# Altium footprint library HFPB_01-PCBLib.PcbLib: 102 footprints (part 4 of 7)
Each footprint in its own frame and in the unit in brackets; x right, y up, seen from the top. Pads: shape width x height; smd on the part's side, far side on the other; paste and mask are expansions set on the pad; w line width, h text height; cw(c..) or ccw(c..) is an arc to the next point about the centre after c.
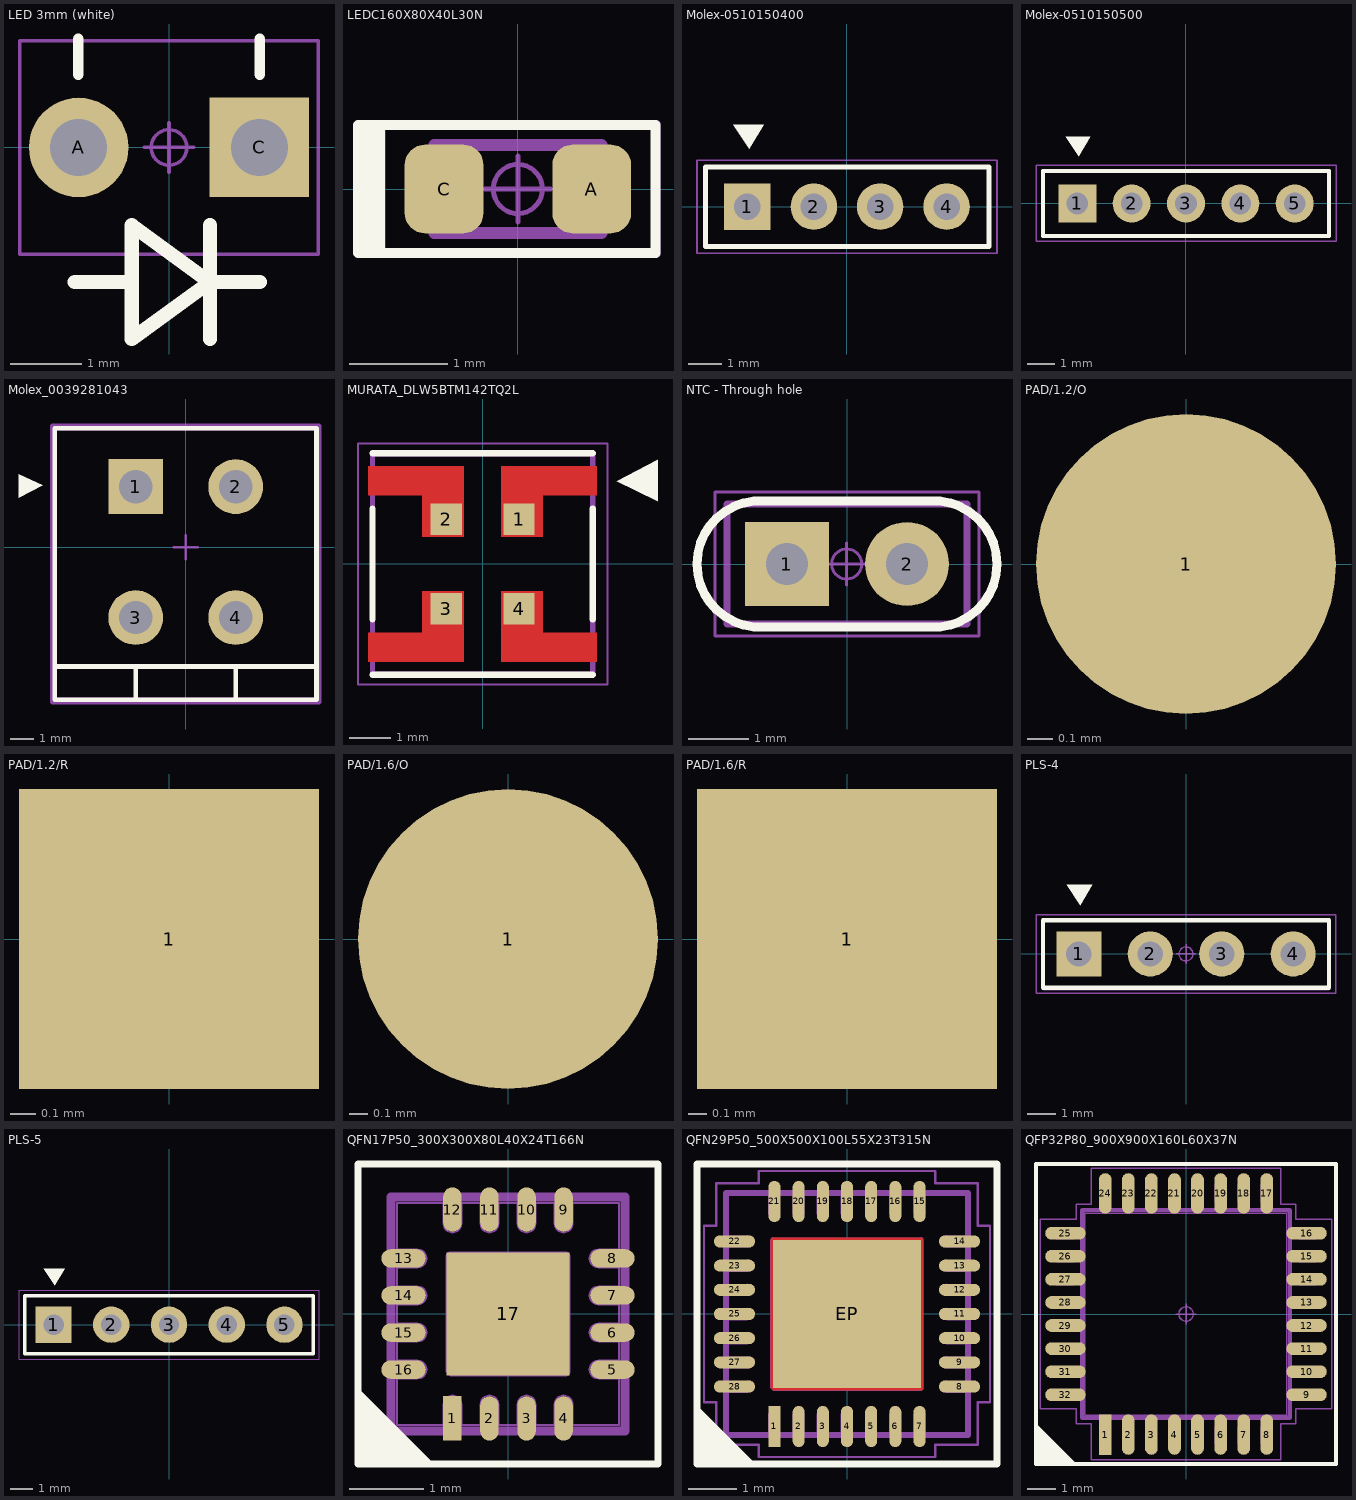
[diagram p3: the footprints below, top view; thin cyan lines are the x and y axes]

## LED 3mm (white) [mm] "Through Hole, Right Angle 2 cont. 5.08mm"
height 3
pads (2):
  round 1.4 hole 0.8: A(-1.27,0)
  rect 1.4x1.4 hole 0.8: C(1.27,0)
Top Overlay:
  lines w0.15: -1.275,1.025 -1.275,1.525 ; 1.275,1.025 1.275,1.525
  lines w0.2: -1.325,-1.893 -0.525,-1.893 ; 0.575,-2.693 0.575,-1.093 ; 1.275,-1.893 0.575,-1.893 ; 0.575,-1.893 -0.525,-2.693 -0.525,-1.093 0.575,-1.893
Mechanical 15:
  circle w0.05: c0,0 r0.25
  lines w0.05: -0.35,0 0.35,0 ; 0,-0.35 0,0.35 ; -2.1,-1.5 -2.1,1.5 2.1,1.5 2.1,-1.5 -2.1,-1.5
Mechanical 16:
  text ".Designator" at -2.275,3.4 h1.2
3D body "LED-3mm-white+.stp": height 1.92, standoff -1.92, extent -1.445,-0.675 2,17.125

## LEDC160X80X40L30N [mm] "LED, Chip; 1.60 mm L X 0.80 mm W X 0.40 mm H body"
height 0.4
pads (2):
  rrect50% 0.8x0.9 smd: A(0.75,0) C(-0.75,0)
Top Overlay:
  lines w0.1: -1.55,-0.65 -1.55,0.65 ; -1.525,-0.65 -1.525,0.65 ; -1.475,-0.65 -1.475,0.65 ; -1.4,-0.65 -1.4,0.65 ; -1.625,-0.65 1.4,-0.65 1.4,0.65 -1.625,0.65 -1.625,-0.65
Mechanical 11:
  lines w0.12: -0.85,-0.45 0.85,-0.45 0.85,0.45 -0.85,0.45 -0.85,-0.45
Mechanical 12:
  lines w0.025: -0.8,-0.4 0.8,-0.4 ; -0.8,-0.4 -0.8,0.4 ; -0.8,-0.4 -0.8,0.4 ; -0.8,-0.4 -0.5,-0.4 -0.5,0.4 -0.8,0.4 ; -0.8,0.4 0.8,0.4 ; 0.8,-0.4 0.8,0.4 ; 0.8,-0.4 0.5,-0.4 0.5,0.4 0.8,0.4 ; 0.8,-0.4 0.8,0.4
Mechanical 15:
  circle w0.05: c0,0 r0.25
  lines w0.05: -0.335,0 0.335,0 ; 0,-0.335 0,0.335 ; -1.37,-0.67 1.425,-0.67 1.425,0.67 -1.37,0.67 -1.37,-0.67
Mechanical 16:
  text ".Designator" at 0.325,0.925 h1.2
3D body "STEP-WL-SMCW-0603-rev1.stp": height 0.7, standoff 0, extent -0.775,-0.4 0.825,0.4

## Molex-0510150400 [mm] "Header, Vertical, 2.00 mm pitch, 4 pins, 1 row, 4 pins per row"
height 3.8
pads (4):
  rect 1.4x1.4 hole 0.8 paste-1.6: 1(-3,0)
  round 1.4 hole 0.8 paste-1.6: 2(-1,0) 3(1,0) 4(3,0)
Top Overlay:
  region: -2.514,2.463 -3.421,2.463 -2.949,1.737
  lines w0.15: -4.27,-1.2 -4.27,1.2 4.275,1.2 4.275,-1.2 -4.27,-1.2
Mechanical 11:
  lines w0.12: -4.27,-1.2 -4.27,1.2 4.275,1.2 4.275,-1.2 -4.27,-1.2
Mechanical 12:
  lines w0.025: -4.27,-1.2 -4.27,1.2 4.275,1.2 4.275,-1.2 -4.27,-1.2 ; -3.32,-0.32 -3.32,0.32 -2.68,0.32 -2.68,-0.32 -3.32,-0.32 ; -1.33,-0.32 -1.33,0.32 -0.69,0.32 -0.69,-0.32 -1.33,-0.32 ; 0.68,-0.325 0.68,0.315 1.32,0.315 1.32,-0.325 0.68,-0.325 ; 2.67,-0.325 3.31,-0.325 3.31,0.315 2.67,0.315 2.67,-0.325
Mechanical 15:
  circle w0.05: c0.81,0 r0.25
  lines w0.05: 0.46,0 1.16,0 ; 0.81,-0.35 0.81,0.35 ; -4.52,-1.4 -4.52,1.4 4.52,1.4 4.52,-1.4 -4.52,-1.4
Mechanical 16:
  text ".Designator" at -3,0 h1.2

## Molex-0510150500 [mm] "Header, Vertical, 2.00 mm pitch, 5 pins, 1 row, 5 pins per row"
height 3.8
pads (5):
  rect 1.4x1.4 hole 0.8 paste-1.6: 1(-4,0)
  round 1.4 hole 0.8 paste-1.6: 2(-2,0) 3(0,0) 4(2,0) 5(4,0)
Top Overlay:
  region: -3.514,2.463 -4.421,2.463 -3.949,1.737
  lines w0.15: -5.27,-1.2 5.27,-1.2 5.27,1.2 -5.27,1.2 -5.27,-1.2
Mechanical 11:
  lines w0.12: -5.27,-1.2 5.27,-1.2 5.27,1.2 -5.27,1.2 -5.27,-1.2
Mechanical 12:
  lines w0.025: -5.27,-1.2 5.27,-1.2 5.27,1.2 -5.27,1.2 -5.27,-1.2 ; -4.32,-0.32 -3.68,-0.32 -3.68,0.32 -4.32,0.32 -4.32,-0.32 ; -2.33,-0.32 -1.69,-0.32 -1.69,0.32 -2.33,0.32 -2.33,-0.32 ; -0.32,-0.325 0.32,-0.325 0.32,0.315 -0.32,0.315 -0.32,-0.325 ; 1.67,-0.325 1.67,0.315 2.31,0.315 2.31,-0.325 1.67,-0.325
Mechanical 15:
  circle w0.05: c-0.19,0 r0.25
  lines w0.05: -0.54,0 0.16,0 ; -0.19,-0.35 -0.19,0.35 ; -5.52,-1.4 5.52,-1.4 5.52,1.4 -5.52,1.4 -5.52,-1.4
Mechanical 16:
  text ".Designator" at -4,0 h1.2

## Molex_0039281043 [mm] "Connector Header Through Hole 4 position 4.2mm"
height 12.8
pads (4):
  rect 2.3x2.3 hole 1.4 paste-1000 mask+0: 1(-2.1,2.55)
  round 2.3 hole 1.4 paste-1000 mask+0: 2(2.1,2.55) 3(-2.1,-2.95) 4(2.1,-2.95)
Top Overlay:
  region: -7,3.075 -7,2.075 -6.012,2.601
  lines w0.2: -5.5,-5 5.5,-5 ; -2.1,-6.4 -2.1,-5 ; 2.1,-6.4 2.1,-5 ; -5.5,-6.4 -5.5,5 5.5,5 5.5,-6.4 -5.5,-6.4
Mechanical 10:
  lines w0.2: -5.6,-6.5 -5.6,5.1 5.6,5.1 5.6,-6.5 -5.6,-6.5
  text ".Designator" at 0.1,-0.7 h1
Mechanical 12:
  lines w0.2: -5.5,-6.4 -5.5,5 5.5,5 5.5,-6.4 -5.5,-6.4
Mechanical 15:
  lines w0.1: -0.5,0 0.5,0 ; 0,-0.5 0,0.5
  lines w0.2: -5.6,-6.5 -5.6,5.1 5.6,5.1 5.6,-6.5 -5.6,-6.5
3D body "Conn_Molex_0039281043_eec.STEP": height 0.25, standoff 0, extent -5.6,-6.5 5.8,5.1

## MURATA_DLW5BTM142TQ2L [mm]
pads (4):
  rect 0.75x0.75 smd: 1(0.875,1.075) 2(-0.875,1.075) 3(-0.875,-1.075) 4(0.875,-1.075)
Top Layer:
  region: -0.45,-2.35 -2.75,-2.35 -2.75,-1.65 -1.45,-1.65 -1.45,-0.65 -0.45,-0.65
  region: 2.75,1.65 1.45,1.65 1.45,0.65 0.45,0.65 0.45,2.35 2.75,2.35
  region: 1.45,-1.65 2.75,-1.65 2.75,-2.35 0.45,-2.35 0.45,-0.65 1.45,-0.65
  region: -0.45,0.65 -1.45,0.65 -1.45,1.65 -2.75,1.65 -2.75,2.35 -0.45,2.35
Top Overlay:
  region: 4.219,1.513 4.219,2.513 3.231,1.987
  lines w0.15: -2.65,-2.663 2.65,-2.663 ; -2.65,-1.336 -2.65,1.336 ; -2.65,2.663 2.65,2.663 ; 2.65,-1.336 2.65,1.336
Top Paste:
  region: -0.45,-2.35 -2.75,-2.35 -2.75,-1.65 -1.45,-1.65 -1.45,-0.65 -0.45,-0.65
  region: 2.75,1.65 1.45,1.65 1.45,0.65 0.45,0.65 0.45,2.35 2.75,2.35
  region: 1.45,-1.65 2.75,-1.65 2.75,-2.35 0.45,-2.35 0.45,-0.65 1.45,-0.65
  region: -0.45,0.65 -1.45,0.65 -1.45,1.65 -2.75,1.65 -2.75,2.35 -0.45,2.35
Top Solder:
  region: -0.4,-2.4 -2.8,-2.4 -2.8,-1.6 -1.5,-1.6 -1.5,-0.6 -0.4,-0.6
  region: 2.8,1.6 1.5,1.6 1.5,0.6 0.4,0.6 0.4,2.4 2.8,2.4
  region: 1.5,-1.6 2.8,-1.6 2.8,-2.4 0.4,-2.4 0.4,-0.6 1.5,-0.6
  region: -0.4,0.6 -1.5,0.6 -1.5,1.6 -2.8,1.6 -2.8,2.4 -0.4,2.4
Mechanical 13:
  lines w0.127: -2.65,-2.65 -2.65,2.65 2.65,2.65 2.65,-2.65 -2.65,-2.65
Mechanical 15:
  lines w0.05: -3,-2.9 -3,2.9 3,2.9 3,-2.9 -3,-2.9
3D body "DLW5BTM142TQ2L--3DModel-STEP-1.STEP": height 2.5, standoff 0, extent -2.5,-2.5 2.5,2.5

## NTC - Through hole [mm]
pads (2):
  rect 1.4x1.4 hole 0.7 paste-1.6: 1(-1,0)
  round 1.4 hole 0.7 paste-1.6: 2(1,0)
Top Overlay:
  lines w0.15: -1.55,-1.05 cw(c-1.445,0) -1.55,1.05 1.55,1.05 cw(c1.445,0) 1.55,-1.05 -1.55,-1.05
Mechanical 11:
  lines w0.12: -2,-1 -2,1 2,1 2,-1 -2,-1
Mechanical 12:
  lines w0.025: -2,-1 -2,1 2.002,1 2.002,-1 -2,-1 ; -1.315,-0.32 -1.315,0.32 -0.675,0.32 -0.675,-0.32 -1.315,-0.32 ; 0.68,-0.32 0.68,0.32 1.32,0.32 1.32,-0.32 0.68,-0.32
Mechanical 15:
  circle w0.05: c-0.005,0 r0.25
  lines w0.05: -0.355,0 0.345,0 ; -0.005,-0.35 -0.005,0.35 ; -2.2,-1.2 -2.2,1.2 2.2,1.2 2.2,-1.2 -2.2,-1.2
Mechanical 16:
  text ".Designator" at -1.15,1.45 h1.2

## PAD/1.2/O [mm] "PAD SMD 1.2mm"
pads (1):
  round 1.2 smd: 1(0,0)
Mechanical 12:
  lines w0.025: -0.28,-0.15 -0.28,0.15 0.28,0.15 0.28,-0.15 -0.28,-0.15
Mechanical 15:
  circle w0.05: c0,0 r0.25
  lines w0.05: -0.35,0 0.35,0 ; 0,-0.35 0,0.35
Mechanical 16:
  text ".Designator" at -0.8,1.3 h1.2

## PAD/1.2/R [mm] "PAD SMD 1.2mm"
pads (1):
  rect 1.2x1.2 smd: 1(0,0)
Mechanical 12:
  lines w0.025: -0.28,-0.15 0.28,-0.15 0.28,0.15 -0.28,0.15 -0.28,-0.15
Mechanical 15:
  circle w0.05: c0,0 r0.25
  lines w0.05: -0.35,0 0.35,0 ; 0,-0.35 0,0.35
Mechanical 16:
  text ".Designator" at -0.8,1.3 h1.2

## PAD/1.6/O [mm] "PAD SMD 1.6mm"
pads (1):
  round 1.6 smd: 1(0,0)
Mechanical 12:
  lines w0.025: -0.28,-0.15 -0.28,0.15 0.28,0.15 0.28,-0.15 -0.28,-0.15
Mechanical 15:
  circle w0.05: c0,0 r0.25
  lines w0.05: -0.35,0 0.35,0 ; 0,-0.35 0,0.35
Mechanical 16:
  text ".Designator" at -0.8,1.3 h1.2

## PAD/1.6/R [mm] "PAD SMD 1.6mm"
pads (1):
  rect 1.6x1.6 smd: 1(0,0)
Mechanical 12:
  lines w0.025: -0.28,-0.15 -0.28,0.15 0.28,0.15 0.28,-0.15 -0.28,-0.15
Mechanical 15:
  circle w0.05: c0,0 r0.25
  lines w0.05: -0.35,0 0.35,0 ; 0,-0.35 0,0.35
Mechanical 16:
  text ".Designator" at -0.8,1.3 h1.2

## PLS-4 [mm] "Header, Vertical, 2.54 mm pitch; 0.64 mm lead width, 4 pins, 1 row, 4 pins per row, 10.16 mm L X 2.54 mm W X 8.40 mm H body"
height 8.4
pads (4):
  rect 1.6x1.6 hole 0.9 paste-1.6: 1(-3.81,0)
  round 1.6 hole 0.9 paste-1.6: 2(-1.27,0) 3(1.27,0) 4(3.81,0)
Top Overlay:
  region: -3.324,2.463 -4.231,2.463 -3.759,1.737
  lines w0.15: -5.08,-1.2 5.08,-1.2 5.08,1.2 -5.08,1.2 -5.08,-1.2
Mechanical 11:
  lines w0.12: -5.08,-1.2 5.08,-1.2 5.08,1.2 -5.08,1.2 -5.08,-1.2
Mechanical 12:
  lines w0.025: -5.08,-1.27 5.08,-1.27 5.08,1.27 -5.08,1.27 -5.08,-1.27 ; -4.13,-0.32 -3.49,-0.32 -3.49,0.32 -4.13,0.32 -4.13,-0.32 ; -1.59,-0.32 -0.95,-0.32 -0.95,0.32 -1.59,0.32 -1.59,-0.32 ; 0.95,-0.32 1.59,-0.32 1.59,0.32 0.95,0.32 0.95,-0.32 ; 3.5,-0.315 3.5,0.325 4.14,0.325 4.14,-0.315 3.5,-0.315
Mechanical 15:
  circle w0.05: c0,0 r0.25
  lines w0.05: -0.35,0 0.35,0 ; 0,-0.35 0,0.35 ; -5.33,-1.4 5.33,-1.4 5.33,1.4 -5.33,1.4 -5.33,-1.4
Mechanical 16:
  text ".Designator" at -3.81,0 h1.2
3D body "HDRV4W62P254_4X1_1016X241H838.STEP": height 8.38, standoff -2, extent -5.08,-1.205 5.08,1.205

## PLS-5 [mm] "Header, Vertical, 2.54 mm pitch; 0.64 mm lead width, 5 pins, 1 row, 5 pins per row, 12.70 mm L X 2.54 mm W X 8.40 mm H body"
height 8.4
pads (5):
  rect 1.6x1.6 hole 0.9 paste-1.6: 1(-5.08,0)
  round 1.6 hole 0.9 paste-1.6: 2(-2.54,0) 3(0,0) 4(2.54,0) 5(5.08,0)
Top Overlay:
  region: -4.594,2.463 -5.501,2.463 -5.029,1.737
  lines w0.15: -6.35,-1.27 6.35,-1.27 6.35,1.27 -6.35,1.27 -6.35,-1.27
Mechanical 11:
  lines w0.12: -6.35,-1.27 6.35,-1.27 6.35,1.27 -6.35,1.27 -6.35,-1.27
Mechanical 12:
  lines w0.025: -6.35,-1.27 6.35,-1.27 6.35,1.27 -6.35,1.27 -6.35,-1.27 ; -5.4,-0.32 -4.76,-0.32 -4.76,0.32 -5.4,0.32 -5.4,-0.32 ; -2.86,-0.32 -2.22,-0.32 -2.22,0.32 -2.86,0.32 -2.86,-0.32 ; -0.32,-0.32 0.32,-0.32 0.32,0.32 -0.32,0.32 -0.32,-0.32 ; 2.22,-0.32 2.86,-0.32 2.86,0.32 2.22,0.32 2.22,-0.32 ; 4.76,-0.32 5.4,-0.32 5.4,0.32 4.76,0.32 4.76,-0.32
Mechanical 15:
  circle w0.05: c-5.08,0 r0.25
  lines w0.05: -5.43,0 -4.73,0 ; -5.08,-0.35 -5.08,0.35 ; -6.6,-1.52 6.6,-1.52 6.6,1.52 -6.6,1.52 -6.6,-1.52
Mechanical 16:
  text ".Designator" at -5.08,0 h1.2
3D body "HDRV5W63P254_5X1_1270X254H840.STEP": height 8.4, standoff -2, extent -6.35,-1.27 6.35,1.27

## QFN17P50_300X300X80L40X24T166N [mm] "Quad Flat No-Lead (QFN with Tab), 0.50 mm pitch; square, 4 pin X 4 pin, 3.00 mm L X 3.00 mm W X 0.80 mm H body"
height 0.8
pads (17):
  rect 0.25x0.6 smd: 1(-0.75,-1.41)
  oval 0.25x0.6 smd: 2(-0.25,-1.41) 3(0.25,-1.41) 4(0.75,-1.41) 9(0.75,1.41) 10(0.25,1.41) 11(-0.25,1.41) 12(-0.75,1.41)
  oval 0.6x0.25 smd: 5(1.41,-0.75) 6(1.41,-0.25) 7(1.41,0.25) 8(1.41,0.75) 13(-1.41,0.75) 14(-1.41,0.25) 15(-1.41,-0.25) 16(-1.41,-0.75)
  rect 1.66x1.66 smd: 17(0,0)
Top Overlay:
  region: -2.025,-1 -2.025,-2.025 -1,-2.025
  lines w0.1: -2.025,-2.025 2.025,-2.025 2.025,2.025 -2.025,2.025 -2.025,-2.025
Top Paste:
  region: 0.71,-0.71 0.12,-0.71 0.12,-0.12 0.71,-0.12
  region: 0.71,0.12 0.12,0.12 0.12,0.71 0.71,0.71
  region: -0.12,-0.71 -0.71,-0.71 -0.71,-0.12 -0.12,-0.12
  region: -0.12,0.12 -0.71,0.12 -0.71,0.71 -0.12,0.71
Mechanical 11:
  lines w0.12: -1.58,-1.58 -1.58,1.58 1.58,1.58 1.58,-1.58 -1.58,-1.58
Mechanical 12:
  lines w0.025: -1.5,-1.5 -1.5,1.5 1.5,1.5 1.5,-1.5 -1.5,-1.5 ; -1.5,-0.87 -1.22,-0.87 ccw(c-1.22,-0.75) -1.22,-0.63 -1.5,-0.63 -1.5,-0.87 ; -1.5,-0.37 -1.22,-0.37 ccw(c-1.22,-0.25) -1.22,-0.13 -1.5,-0.13 -1.5,-0.37 ; -1.5,0.13 -1.22,0.13 ccw(c-1.22,0.25) -1.22,0.37 -1.5,0.37 -1.5,0.13 ; -1.5,0.63 -1.22,0.63 ccw(c-1.22,0.75) -1.22,0.87 -1.5,0.87 -1.5,0.63 ; -0.87,-1.5 -0.87,-1.22 cw(c-0.75,-1.22) -0.63,-1.22 -0.63,-1.5 -0.87,-1.5 ; -0.87,1.22 ccw(c-0.75,1.22) -0.63,1.22 -0.63,1.5 -0.87,1.5 -0.87,1.22 ; -0.83,-0.78 -0.83,0.78 cw(c-0.78,0.78) -0.78,0.83 0.78,0.83 cw(c0.78,0.78) 0.83,0.78 0.83,-0.78 cw(c0.78,-0.78) 0.78,-0.83 -0.78,-0.83 -0.83,-0.78 ; -0.37,-1.5 -0.37,-1.22 cw(c-0.25,-1.22) -0.13,-1.22 -0.13,-1.5 -0.37,-1.5 ; -0.37,1.22 ccw(c-0.25,1.22) -0.13,1.22 -0.13,1.5 -0.37,1.5 -0.37,1.22 ; 0.13,-1.5 0.13,-1.22 cw(c0.25,-1.22) 0.37,-1.22 0.37,-1.5 0.13,-1.5 ; 0.13,1.22 ccw(c0.25,1.22) 0.37,1.22 0.37,1.5 0.13,1.5 0.13,1.22 ; 0.63,-1.5 0.63,-1.22 cw(c0.75,-1.22) 0.87,-1.22 0.87,-1.5 0.63,-1.5 ; 0.63,1.22 ccw(c0.75,1.22) 0.87,1.22 0.87,1.5 0.63,1.5 0.63,1.22 ; 1.22,-0.87 cw(c1.22,-0.75) 1.22,-0.63 1.5,-0.63 1.5,-0.87 1.22,-0.87 ; 1.22,-0.37 cw(c1.22,-0.25) 1.22,-0.13 1.5,-0.13 1.5,-0.37 1.22,-0.37 ; 1.22,0.13 cw(c1.22,0.25) 1.22,0.37 1.5,0.37 1.5,0.13 1.22,0.13 ; 1.22,0.63 cw(c1.22,0.75) 1.22,0.87 1.5,0.87 1.5,0.63 1.22,0.63
Mechanical 15:
  circle w0.05: c0,0 r0.25
  lines w0.05: -0.35,0 0.35,0 ; 0,-0.35 0,0.35 ; -2.025,-2.025 -2.025,2.025 2.025,2.025 2.025,-2.025 1.08,-2.025 -2.025,-2.025
Mechanical 16:
  text ".Designator" at 0,0 h1.2
3D body "QFN17P50_300X300X80L40X24T166.STEP": height 0.8, standoff 0, extent -1.55,-1.55 1.55,1.55

## QFN29P50_500X500X100L55X23T315N [mm] "Quad Flat No-Lead (QFN with Tab), 0.50 mm pitch; square, 7 pin X 7 pin, 5.00 mm L X 5.00 mm W X 1.00 mm H body"
height 1
pads (29):
  rect 0.25x0.85 smd: 1(-1.5,-2.325)
  oval 0.25x0.85 smd: 2(-1,-2.325) 3(-0.5,-2.325) 4(0,-2.325) 5(0.5,-2.325) 6(1,-2.325) 7(1.5,-2.325) 15(1.5,2.325) 16(1,2.325) 17(0.5,2.325) 18(0,2.325) 19(-0.5,2.325) 20(-1,2.325) 21(-1.5,2.325)
  oval 0.85x0.25 smd: 8(2.325,-1.5) 9(2.325,-1) 10(2.325,-0.5) 11(2.325,0) 12(2.325,0.5) 13(2.325,1) 14(2.325,1.5) 22(-2.325,1.5) 23(-2.325,1) 24(-2.325,0.5) 25(-2.325,0) 26(-2.325,-0.5) 27(-2.325,-1) 28(-2.325,-1.5)
  rect 3.05x3.05 smd paste-3.05 mask-3.05: EP(0,0)
Top Layer:
  region: 1.575,0 1.575,-1.525 1.574,-1.533 1.573,-1.54 1.57,-1.548 1.566,-1.554 1.56,-1.56 1.554,-1.566 1.548,-1.57 1.54,-1.573 1.533,-1.574 -1.525,-1.575 -1.575,-1.525 -1.575,1.525 -1.574,1.533 -1.573,1.54 -1.57,1.548 -1.566,1.554 -1.56,1.56 -1.554,1.566 -1.548,1.57 -1.54,1.573 -1.533,1.574 1.525,1.575 1.533,1.574 1.54,1.573 1.548,1.57 1.554,1.566 1.56,1.56 1.566,1.554 1.57,1.548 1.573,1.54 1.574,1.533 1.575,1.525
Top Overlay:
  region: -3.1,-1.9 -3.1,-3.1 -1.9,-3.1
  lines w0.15: -3.1,-3.1 3.1,-3.1 3.1,3.1 -3.1,3.1 -3.1,-3.1
Top Paste:
  region: -0.23,0.23 -1.34,0.23 -1.34,1.34 -0.23,1.34
  region: -0.23,-1.34 -1.34,-1.34 -1.34,-0.23 -0.23,-0.23
  region: 1.34,0.23 0.23,0.23 0.23,1.34 1.34,1.34
  region: 1.34,-1.34 0.23,-1.34 0.23,-0.23 1.34,-0.23
Top Solder:
  region: 1.575,0 1.575,-1.525 1.574,-1.533 1.573,-1.54 1.57,-1.548 1.566,-1.554 1.56,-1.56 1.554,-1.566 1.548,-1.57 1.54,-1.573 1.533,-1.574 -1.525,-1.575 -1.575,-1.525 -1.575,1.525 -1.574,1.533 -1.573,1.54 -1.57,1.548 -1.566,1.554 -1.56,1.56 -1.554,1.566 -1.548,1.57 -1.54,1.573 -1.533,1.574 1.525,1.575 1.533,1.574 1.54,1.573 1.548,1.57 1.554,1.566 1.56,1.56 1.566,1.554 1.57,1.548 1.573,1.54 1.574,1.533 1.575,1.525
Mechanical 11:
  lines w0.12: -2.5,-2.5 2.5,-2.5 2.5,2.5 -2.5,2.5 -2.5,-2.5
Mechanical 12:
  lines w0.025: -2.5,-2.5 2.5,-2.5 2.5,2.5 -2.5,2.5 -2.5,-2.5 ; -2.5,-1.615 -2.5,-1.385 -2.065,-1.385 cw(c-2.065,-1.5) -2.065,-1.615 -2.5,-1.615 ; -2.5,-1.115 -2.5,-0.885 -2.065,-0.885 cw(c-2.065,-1) -2.065,-1.115 -2.5,-1.115 ; -2.5,-0.615 -2.5,-0.385 -2.065,-0.385 cw(c-2.065,-0.5) -2.065,-0.615 -2.5,-0.615 ; -2.5,-0.115 -2.5,0.115 -2.065,0.115 cw(c-2.065,0) -2.065,-0.115 -2.5,-0.115 ; -2.5,0.385 -2.5,0.615 -2.065,0.615 cw(c-2.065,0.5) -2.065,0.385 -2.5,0.385 ; -2.5,0.885 -2.5,1.115 -2.065,1.115 cw(c-2.065,1) -2.065,0.885 -2.5,0.885 ; -2.5,1.385 -2.5,1.615 -2.065,1.615 cw(c-2.065,1.5) -2.065,1.385 -2.5,1.385 ; -1.615,-2.5 -1.385,-2.5 -1.385,-2.065 ccw(c-1.5,-2.065) -1.615,-2.065 -1.615,-2.5 ; -1.615,2.065 ccw(c-1.5,2.065) -1.385,2.065 -1.385,2.5 -1.615,2.5 -1.615,2.065 ; -1.575,-1.525 -1.525,-1.575 1.525,-1.575 ccw(c1.525,-1.525) 1.575,-1.525 1.575,1.525 ccw(c1.525,1.525) 1.525,1.575 -1.525,1.575 ccw(c-1.525,1.525) -1.575,1.525 -1.575,-1.525 ; -1.115,-2.5 -0.885,-2.5 -0.885,-2.065 ccw(c-1,-2.065) -1.115,-2.065 -1.115,-2.5 ; -1.115,2.065 ccw(c-1,2.065) -0.885,2.065 -0.885,2.5 -1.115,2.5 -1.115,2.065 ; -0.615,-2.5 -0.385,-2.5 -0.385,-2.065 ccw(c-0.5,-2.065) -0.615,-2.065 -0.615,-2.5 ; -0.615,2.065 ccw(c-0.5,2.065) -0.385,2.065 -0.385,2.5 -0.615,2.5 -0.615,2.065 ; -0.115,-2.5 0.115,-2.5 0.115,-2.065 ccw(c0,-2.065) -0.115,-2.065 -0.115,-2.5 ; -0.115,2.065 ccw(c0,2.065) 0.115,2.065 0.115,2.5 -0.115,2.5 -0.115,2.065 ; 0.385,-2.5 0.615,-2.5 0.615,-2.065 ccw(c0.5,-2.065) 0.385,-2.065 0.385,-2.5 ; 0.385,2.065 ccw(c0.5,2.065) 0.615,2.065 0.615,2.5 0.385,2.5 0.385,2.065 ; 0.885,-2.5 1.115,-2.5 1.115,-2.065 ccw(c1,-2.065) 0.885,-2.065 0.885,-2.5 ; 0.885,2.065 ccw(c1,2.065) 1.115,2.065 1.115,2.5 0.885,2.5 0.885,2.065 ; 1.385,-2.5 1.615,-2.5 1.615,-2.065 ccw(c1.5,-2.065) 1.385,-2.065 1.385,-2.5 ; 1.385,2.065 ccw(c1.5,2.065) 1.615,2.065 1.615,2.5 1.385,2.5 1.385,2.065 ; 2.065,-1.615 cw(c2.065,-1.5) 2.065,-1.385 2.5,-1.385 2.5,-1.615 2.065,-1.615 ; 2.065,-1.115 cw(c2.065,-1) 2.065,-0.885 2.5,-0.885 2.5,-1.115 2.065,-1.115 ; 2.065,-0.615 cw(c2.065,-0.5) 2.065,-0.385 2.5,-0.385 2.5,-0.615 2.065,-0.615 ; 2.065,-0.115 cw(c2.065,0) 2.065,0.115 2.5,0.115 2.5,-0.115 2.065,-0.115 ; 2.065,0.385 cw(c2.065,0.5) 2.065,0.615 2.5,0.615 2.5,0.385 2.065,0.385 ; 2.065,0.885 cw(c2.065,1) 2.065,1.115 2.5,1.115 2.5,0.885 2.065,0.885 ; 2.065,1.385 cw(c2.065,1.5) 2.065,1.615 2.5,1.615 2.5,1.385 2.065,1.385
Mechanical 15:
  circle w0.05: c0,0 r0.25
  lines w0.05: -0.35,0 0.35,0 ; 0,-0.35 0,0.35 ; -2.955,-1.825 -2.7,-1.825 -2.7,-2.7 -1.825,-2.7 -1.825,-2.955 1.825,-2.955 1.825,-2.7 2.7,-2.7 2.7,-1.825 2.955,-1.825 2.955,1.825 2.7,1.825 2.7,2.7 1.825,2.7 1.825,2.955 -1.825,2.955 -1.825,2.7 -2.7,2.7 -2.7,1.825 -2.955,1.825 -2.955,-1.825
Mechanical 16:
  text ".Designator" at 0,0 h1.2
3D body "QFN29P50_500X500X100L55X23T315.STEP": height 1, standoff 0, extent -2.55,-2.55 2.55,2.55

## QFP32P80_900X900X160L60X37N [mm] "Quad Flat Pack (QFP), 0.80 mm pitch; square, 8 pin X 8 pin, 7.00 mm L X 7.00 mm W X 1.60 mm H body"
height 1.6
pads (32):
  rect 0.44x1.4 smd: 1(-2.8,-4.18)
  oval 0.44x1.4 smd: 2(-2,-4.18) 3(-1.2,-4.18) 4(-0.4,-4.18) 5(0.4,-4.18) 6(1.2,-4.18) 7(2,-4.18) 8(2.8,-4.18) 17(2.8,4.18) 18(2,4.18) 19(1.2,4.18) 20(0.4,4.18) 21(-0.4,4.18) 22(-1.2,4.18) 23(-2,4.18) 24(-2.8,4.18)
  oval 1.4x0.44 smd: 9(4.18,-2.8) 10(4.18,-2) 11(4.18,-1.2) 12(4.18,-0.4) 13(4.18,0.4) 14(4.18,1.2) 15(4.18,2) 16(4.18,2.8) 25(-4.18,2.8) 26(-4.18,2) 27(-4.18,1.2) 28(-4.18,0.4) 29(-4.18,-0.4) 30(-4.18,-1.2) 31(-4.18,-2) 32(-4.18,-2.8)
Top Overlay:
  region: -5.2,-3.8 -5.2,-5.2 -3.8,-5.2
  lines w0.15: -5.2,-5.2 -5.2,5.2 5.2,5.2 5.2,-5.2 -5.2,-5.2
Mechanical 11:
  lines w0.15: -3.6,-3.6 3.6,-3.6 3.6,3.6 -3.6,3.6 -3.6,-3.6
Mechanical 12:
  lines w0.025: -4.5,-2.987 -4.5,-2.612 -3.9,-2.612 -3.9,-2.987 -4.5,-2.987 ; -4.5,-2.187 -4.5,-1.813 -3.9,-1.813 -3.9,-2.187 -4.5,-2.187 ; -4.5,-1.388 -4.5,-1.012 -3.9,-1.012 -3.9,-1.388 -4.5,-1.388 ; -4.5,-0.587 -4.5,-0.212 -3.9,-0.212 -3.9,-0.587 -4.5,-0.587 ; -4.5,0.212 -4.5,0.587 -3.9,0.587 -3.9,0.212 -4.5,0.212 ; -4.5,1.012 -4.5,1.388 -3.9,1.388 -3.9,1.012 -4.5,1.012 ; -4.5,1.813 -4.5,2.187 -3.9,2.187 -3.9,1.813 -4.5,1.813 ; -4.5,2.612 -4.5,2.987 -3.9,2.987 -3.9,2.612 -4.5,2.612 ; -3.5,-3.5 3.5,-3.5 3.5,3.5 -3.5,3.5 -3.5,-3.5 ; -2.987,-4.5 -2.987,-3.9 -2.612,-3.9 -2.612,-4.5 -2.987,-4.5 ; -2.987,3.9 -2.987,4.5 -2.612,4.5 -2.612,3.9 -2.987,3.9 ; -2.187,-4.5 -2.187,-3.9 -1.813,-3.9 -1.813,-4.5 -2.187,-4.5 ; -2.187,3.9 -2.187,4.5 -1.813,4.5 -1.813,3.9 -2.187,3.9 ; -1.388,-4.5 -1.388,-3.9 -1.012,-3.9 -1.012,-4.5 -1.388,-4.5 ; -1.388,3.9 -1.388,4.5 -1.012,4.5 -1.012,3.9 -1.388,3.9 ; -0.587,-4.5 -0.587,-3.9 -0.212,-3.9 -0.212,-4.5 -0.587,-4.5 ; -0.587,3.9 -0.587,4.5 -0.212,4.5 -0.212,3.9 -0.587,3.9 ; 0.212,-4.5 0.212,-3.9 0.587,-3.9 0.587,-4.5 0.212,-4.5 ; 0.212,3.9 0.212,4.5 0.587,4.5 0.587,3.9 0.212,3.9 ; 1.012,-4.5 1.012,-3.9 1.388,-3.9 1.388,-4.5 1.012,-4.5 ; 1.012,3.9 1.012,4.5 1.388,4.5 1.388,3.9 1.012,3.9 ; 1.813,-4.5 1.813,-3.9 2.187,-3.9 2.187,-4.5 1.813,-4.5 ; 1.813,3.9 1.813,4.5 2.187,4.5 2.187,3.9 1.813,3.9 ; 2.612,-4.5 2.612,-3.9 2.987,-3.9 2.987,-4.5 2.612,-4.5 ; 2.612,3.9 2.612,4.5 2.987,4.5 2.987,3.9 2.612,3.9 ; 3.9,-2.987 4.5,-2.987 4.5,-2.612 3.9,-2.612 3.9,-2.987 ; 3.9,-2.187 4.5,-2.187 4.5,-1.813 3.9,-1.813 3.9,-2.187 ; 3.9,-1.388 4.5,-1.388 4.5,-1.012 3.9,-1.012 3.9,-1.388 ; 3.9,-0.587 4.5,-0.587 4.5,-0.212 3.9,-0.212 3.9,-0.587 ; 3.9,0.212 4.5,0.212 4.5,0.587 3.9,0.587 3.9,0.212 ; 3.9,1.012 4.5,1.012 4.5,1.388 3.9,1.388 3.9,1.012 ; 3.9,1.813 4.5,1.813 4.5,2.187 3.9,2.187 3.9,1.813 ; 3.9,2.612 4.5,2.612 4.5,2.987 3.9,2.987 3.9,2.612
Mechanical 15:
  circle w0.05: c0,0 r0.25
  lines w0.05: -0.35,0 0.35,0 ; 0,-0.35 0,0.35 ; -5.06,-3.285 -3.8,-3.285 -3.8,-3.8 -3.285,-3.8 -3.285,-5.06 3.285,-5.06 3.285,-3.8 3.8,-3.8 3.8,-3.285 5.06,-3.285 5.06,3.285 3.8,3.285 3.8,3.8 3.285,3.8 3.285,5.06 -3.285,5.06 -3.285,3.8 -3.8,3.8 -3.8,3.285 -5.06,3.285 -5.06,-3.285
Mechanical 16:
  text ".Designator" at 0,0 h1.2
3D body "QFP32P80_900X900X160L60X37.STEP": height 1.6, standoff 0, extent -4.5,-4.5 4.5,4.5